# Altium footprint library Package_DFN_QFN.PcbLib: 735 footprints (part 34 of 46)
Each footprint in its own frame and in the unit in brackets; x right, y up, seen from the top. Pads: shape width x height; smd on the part's side, far side on the other; paste and mask are expansions set on the pad; w line width, h text height; cw(c..) or ccw(c..) is an arc to the next point about the centre after c.
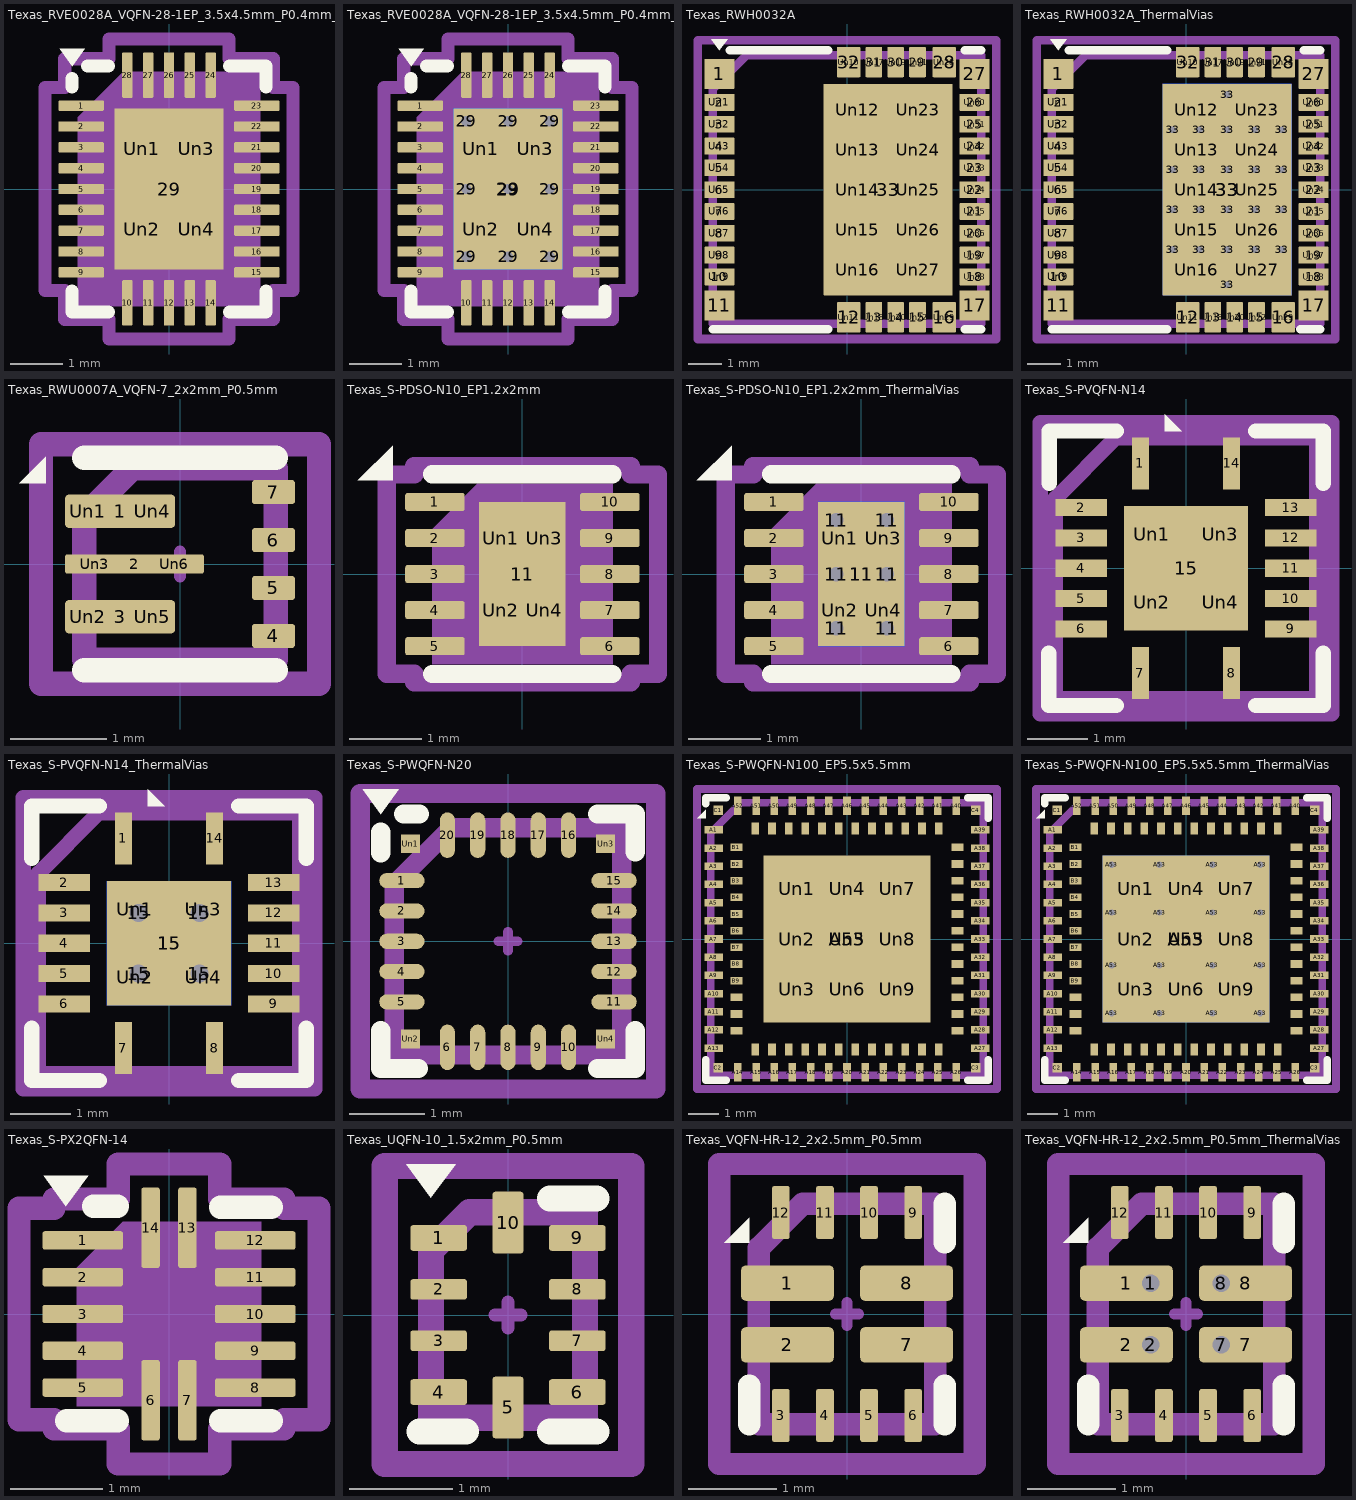
[diagram p33: the footprints below, top view; thin cyan lines are the x and y axes]

## Texas_RVE0028A_VQFN-28-1EP_3.5x4.5mm_P0.4mm_EP2.1x3.1mm [mm] "Texas_RVE0028A_VQFN-28-1EP_3.5x4.5mm_P0.4mm_EP2.1x3.1mm"
pads (33):
  rrect25% 0.875x0.2 smd: 1(-1.687,1.6) 2(-1.687,1.2) 3(-1.687,0.8) 4(-1.687,0.4) 5(-1.687,0) 6(-1.687,-0.4) 7(-1.687,-0.8) 8(-1.687,-1.2) 9(-1.687,-1.6) 15(1.687,-1.6) 16(1.687,-1.2) 17(1.687,-0.8) 18(1.687,-0.4) 19(1.687,0) 20(1.687,0.4) 21(1.687,0.8) 22(1.687,1.2) 23(1.687,1.6)
  rrect25% 0.2x0.875 smd: 10(-0.8,-2.187) 11(-0.4,-2.187) 12(0,-2.187) 13(0.4,-2.187) 14(0.8,-2.187) 24(0.8,2.187) 25(0.4,2.187) 26(0,2.187) 27(-0.4,2.187) 28(-0.8,2.187)
  rect 2.1x3.1 smd: 29(0,0)
  rrect25% 0.85x1.25 on Top Paste: Un1(-0.525,0.775) Un2(-0.525,-0.775) Un3(0.525,0.775) Un4(0.525,-0.775)
F.SilkS:
  region: -1.86,2.36 -2.1,2.69 -1.62,2.69
  lines w0.254: -1.86,-1.96 -1.86,-2.36 -1.16,-2.36 ; -1.86,1.96 -1.86,2.12 ; -1.56,2.36 -1.16,2.36 ; 1.16,-2.36 1.86,-2.36 1.86,-1.96 ; 1.16,2.36 1.86,2.36 1.86,1.96
Top Component Center:
  lines w0.127: -0.127,0 0.127,0 -0.127,0 ; 0,-0.127 0,0.127 0,-0.127
Top Assembly:
  region: 1.75,-2.25 -1.75,-2.25 -1.75,1.375 -0.875,2.25 1.75,2.25
Top Courtyard:
  lines w0.254: -2.38,-1.95 -2,-1.95 -2,-2.5 -1.15,-2.5 -1.15,-2.88 1.15,-2.88 1.15,-2.5 2,-2.5 2,-1.95 2.38,-1.95 2.38,1.95 2,1.95 2,2.5 1.15,2.5 1.15,2.88 -1.15,2.88 -1.15,2.5 -2,2.5 -2,1.95 -2.38,1.95 -2.38,-1.95
Top Designator:
  text ".Designator" at -3.43,-0.344 h1.52
3D body "Texas_RVE0028A_VQFN-28-1EP_3.5x4.5mm_P0.4mm_EP2.1x3.1mm.step": height 0.8, standoff 0, extent -1.75,-2.25 1.75,2.25

## Texas_RVE0028A_VQFN-28-1EP_3.5x4.5mm_P0.4mm_EP2.1x3.1mm_ThermalVias [mm] "Texas_RVE0028A_VQFN-28-1EP_3.5x4.5mm_P0.4mm_EP2.1x3.1mm_ThermalVias"
pads (43):
  rrect25% 0.875x0.2 smd: 1(-1.687,1.6) 2(-1.687,1.2) 3(-1.687,0.8) 4(-1.687,0.4) 5(-1.687,0) 6(-1.687,-0.4) 7(-1.687,-0.8) 8(-1.687,-1.2) 9(-1.687,-1.6) 15(1.687,-1.6) 16(1.687,-1.2) 17(1.687,-0.8) 18(1.687,-0.4) 19(1.687,0) 20(1.687,0.4) 21(1.687,0.8) 22(1.687,1.2) 23(1.687,1.6)
  rrect25% 0.2x0.875 smd: 10(-0.8,-2.187) 11(-0.4,-2.187) 12(0,-2.187) 13(0.4,-2.187) 14(0.8,-2.187) 24(0.8,2.187) 25(0.4,2.187) 26(0,2.187) 27(-0.4,2.187) 28(-0.8,2.187)
  round 0.5 hole 0.2: 29(-0.8,-1.3) 29(-0.8,0) 29(-0.8,1.3) 29(0,-1.3) 29(0,0) 29(0,1.3) 29(0.8,-1.3) 29(0.8,0) 29(0.8,1.3)
  rect 2.1x3.1 smd: 29(0,0)
  rect 2.1x3.1 smd far side: 29(0,0)
  rrect25% 0.88x1.3 on Top Paste: Un1(-0.525,0.775) Un2(-0.525,-0.775) Un3(0.525,0.775) Un4(0.525,-0.775)
F.SilkS:
  region: -1.86,2.36 -2.1,2.69 -1.62,2.69
  lines w0.254: -1.86,-1.96 -1.86,-2.36 -1.16,-2.36 ; -1.86,1.96 -1.86,2.12 ; -1.56,2.36 -1.16,2.36 ; 1.16,-2.36 1.86,-2.36 1.86,-1.96 ; 1.16,2.36 1.86,2.36 1.86,1.96
Top Component Center:
  lines w0.127: -0.127,0 0.127,0 -0.127,0 ; 0,-0.127 0,0.127 0,-0.127
Top Assembly:
  region: 1.75,-2.25 -1.75,-2.25 -1.75,1.375 -0.875,2.25 1.75,2.25
Top Courtyard:
  lines w0.254: -2.38,-1.95 -2,-1.95 -2,-2.5 -1.15,-2.5 -1.15,-2.88 1.15,-2.88 1.15,-2.5 2,-2.5 2,-1.95 2.38,-1.95 2.38,1.95 2,1.95 2,2.5 1.15,2.5 1.15,2.88 -1.15,2.88 -1.15,2.5 -2,2.5 -2,1.95 -2.38,1.95 -2.38,-1.95
Top Designator:
  text ".Designator" at -3.43,-0.344 h1.52
3D body "Texas_RVE0028A_VQFN-28-1EP_3.5x4.5mm_P0.4mm_EP2.1x3.1mm.step": height 0.8, standoff 0, extent -1.75,-2.25 1.75,2.25

## Texas_RWH0032A [mm] "Texas_RWH0032A"
pads (71):
  rrect6% 0.9x0.9 smd: 1(-3.8,3.45) 11(-3.8,-3.45) 17(3.8,-3.45) 27(3.8,3.45)
  rrect10% 0.9x0.5 smd: 2(-3.8,2.6) 3(-3.8,1.95) 4(-3.8,1.3) 5(-3.8,0.65) 6(-3.8,0) 7(-3.8,-0.65) 8(-3.8,-1.3) 9(-3.8,-1.95) 10(-3.8,-2.6) 18(3.8,-2.6) 19(3.8,-1.95) 20(3.8,-1.3) 21(3.8,-0.65) 22(3.8,0) 23(3.8,0.65) 24(3.8,1.3) 25(3.8,1.95) 26(3.8,2.6)
  rrect7% 0.7x0.9 smd: 12(0.05,-3.8) 16(2.9,-3.8) 28(2.9,3.8) 32(0.05,3.8)
  rrect10% 0.5x0.9 smd: 13(0.8,-3.8) 14(1.45,-3.8) 15(2.1,-3.8) 29(2.1,3.8) 30(1.45,3.8) 31(0.8,3.8)
  rrect1% 3.85x6.3 smd: 33(1.225,0)
  rrect12% 0.76x0.4 on Top Paste: Un1(-3.8,2.6) Un2(-3.8,1.95) Un3(-3.8,1.3) Un4(-3.8,0.65) Un5(-3.8,0) Un6(-3.8,-0.65) Un7(-3.8,-1.3) Un8(-3.8,-1.95) Un9(-3.8,-2.6) Un30(3.8,2.6) Un31(3.8,1.95) Un32(3.8,1.3) Un33(3.8,0.65) Un34(3.8,0) Un35(3.8,-0.65) Un36(3.8,-1.3) Un37(3.8,-1.95) Un38(3.8,-2.6)
  rrect8% 0.6x0.76 on Top Paste: Un10(0.05,3.8) Un11(0.05,-3.8) Un28(2.9,3.8) Un29(2.9,-3.8)
  rrect5% 1.6x0.99 on Top Paste: Un12(0.325,2.38) Un13(0.325,1.19) Un14(0.325,0) Un15(0.325,-1.19) Un16(0.325,-2.38) Un23(2.125,2.38) Un24(2.125,1.19) Un25(2.125,0) Un26(2.125,-1.19) Un27(2.125,-2.38)
  rrect12% 0.4x0.76 on Top Paste: Un17(0.8,3.8) Un18(0.8,-3.8) Un19(1.45,3.8) Un20(1.45,-3.8) Un21(2.1,3.8) Un22(2.1,-3.8)
F.SilkS:
  region: -3.8,4.16 -4.04,4.49 -3.56,4.49
  lines w0.254: -4,-4.16 -0.56,-4.16 ; -3.49,4.16 -0.56,4.16 ; 3.51,-4.16 4,-4.16 ; 3.51,4.16 4,4.16
Top Component Center:
  lines w0.127: -0.127,0 0.127,0 -0.127,0 ; 0,-0.127 0,0.127 0,-0.127
Top Assembly:
  lines w0.254: -4,-4 4,-4 4,4 -3,4 -4,3 -4,-4
Top Courtyard:
  lines w0.254: -4.45,-4.45 4.45,-4.45 4.45,4.45 -4.45,4.45 -4.45,-4.45
Top Designator:
  text ".Designator" at -3.43,-0.344 h1.52

## Texas_RWH0032A_ThermalVias [mm] "Texas_RWH0032A_ThermalVias"
pads (94):
  rrect6% 0.9x0.9 smd: 1(-3.8,3.45) 11(-3.8,-3.45) 17(3.8,-3.45) 27(3.8,3.45)
  rrect10% 0.9x0.5 smd: 2(-3.8,2.6) 3(-3.8,1.95) 4(-3.8,1.3) 5(-3.8,0.65) 6(-3.8,0) 7(-3.8,-0.65) 8(-3.8,-1.3) 9(-3.8,-1.95) 10(-3.8,-2.6) 18(3.8,-2.6) 19(3.8,-1.95) 20(3.8,-1.3) 21(3.8,-0.65) 22(3.8,0) 23(3.8,0.65) 24(3.8,1.3) 25(3.8,1.95) 26(3.8,2.6)
  rrect7% 0.7x0.9 smd: 12(0.05,-3.8) 16(2.9,-3.8) 28(2.9,3.8) 32(0.05,3.8)
  rrect10% 0.5x0.9 smd: 13(0.8,-3.8) 14(1.45,-3.8) 15(2.1,-3.8) 29(2.1,3.8) 30(1.45,3.8) 31(0.8,3.8)
  round 0.5 hole 0.2: 33(-0.4,-1.785) 33(-0.4,-0.595) 33(-0.4,0.595) 33(-0.4,1.785) 33(0.4,-1.785) 33(0.4,-0.595) 33(0.4,0.595) 33(0.4,1.785) 33(1.225,-2.835) 33(1.225,-1.785) 33(1.225,-0.595) 33(1.225,0.595) 33(1.225,1.785) 33(1.225,2.835) 33(2.05,-1.785) 33(2.05,-0.595) 33(2.05,0.595) 33(2.05,1.785) 33(2.85,-1.785) 33(2.85,-0.595) 33(2.85,0.595) 33(2.85,1.785)
  rrect1% 3.85x6.3 smd: 33(1.225,0)
  rrect1% 3.85x6.3 smd far side: 33(1.225,0)
  rrect12% 0.76x0.4 on Top Paste: Un1(-3.8,2.6) Un2(-3.8,1.95) Un3(-3.8,1.3) Un4(-3.8,0.65) Un5(-3.8,0) Un6(-3.8,-0.65) Un7(-3.8,-1.3) Un8(-3.8,-1.95) Un9(-3.8,-2.6) Un30(3.8,2.6) Un31(3.8,1.95) Un32(3.8,1.3) Un33(3.8,0.65) Un34(3.8,0) Un35(3.8,-0.65) Un36(3.8,-1.3) Un37(3.8,-1.95) Un38(3.8,-2.6)
  rrect8% 0.6x0.76 on Top Paste: Un10(0.05,3.8) Un11(0.05,-3.8) Un28(2.9,3.8) Un29(2.9,-3.8)
  rrect5% 1.6x0.99 on Top Paste: Un12(0.325,2.38) Un13(0.325,1.19) Un14(0.325,0) Un15(0.325,-1.19) Un16(0.325,-2.38) Un23(2.125,2.38) Un24(2.125,1.19) Un25(2.125,0) Un26(2.125,-1.19) Un27(2.125,-2.38)
  rrect12% 0.4x0.76 on Top Paste: Un17(0.8,3.8) Un18(0.8,-3.8) Un19(1.45,3.8) Un20(1.45,-3.8) Un21(2.1,3.8) Un22(2.1,-3.8)
F.SilkS:
  region: -3.8,4.16 -4.04,4.49 -3.56,4.49
  lines w0.254: -4,-4.16 -0.56,-4.16 ; -3.49,4.16 -0.56,4.16 ; 3.4,-4.16 4,-4.16 ; 3.51,4.16 4,4.16
Top Component Center:
  lines w0.127: -0.127,0 0.127,0 -0.127,0 ; 0,-0.127 0,0.127 0,-0.127
Top Assembly:
  lines w0.254: -4,-4 -4,3 -3,4 4,4 4,-4 -4,-4
Top Courtyard:
  lines w0.254: -4.45,-4.45 -4.45,4.45 4.45,4.45 4.45,-4.45 -4.45,-4.45
Top Designator:
  text ".Designator" at -3.43,-0.344 h1.52

## Texas_RWU0007A_VQFN-7_2x2mm_P0.5mm [mm] "Texas_RWU0007A_VQFN-7_2x2mm_P0.5mm"
pads (13):
  rrect25% 1.15x0.35 smd: 1(-0.625,0.55) 3(-0.625,-0.55)
  rrect25% 1.45x0.2 smd: 2(-0.475,0)
  rrect25% 0.45x0.25 smd: 4(0.975,-0.75) 5(0.975,-0.25) 6(0.975,0.25) 7(0.975,0.75)
  rrect25% 0.475x0.35 on Top Paste: Un1(-0.963,0.55) Un2(-0.963,-0.55) Un4(-0.288,0.55) Un5(-0.288,-0.55)
  rrect25% 0.625x0.2 on Top Paste: Un3(-0.887,0) Un6(-0.062,0)
F.SilkS:
  region: -1.4,0.84 -1.68,0.84 -1.4,1.12
  lines w0.254: -1,-1.11 1,-1.11 ; -1,1.11 1,1.11
Top Component Center:
  lines w0.127: -0.127,0 0.127,0 -0.127,0 ; 0,-0.127 0,0.127 0,-0.127
Top Assembly:
  lines w0.254: -1,-1 -1,0.5 -0.5,1 1,1 1,-1 -1,-1
Top Courtyard:
  lines w0.254: -1.45,-1.25 -1.45,1.25 1.45,1.25 1.45,-1.25 -1.45,-1.25
Top Designator:
  text ".Designator" at -2.251,-0.226 h1

## Texas_S-PDSO-N10_EP1.2x2mm [mm] "Texas_S-PDSO-N10_EP1.2x2mm"
pads (15):
  rrect25% 0.825x0.25 smd: 1(-1.212,1) 2(-1.212,0.5) 3(-1.212,0) 4(-1.212,-0.5) 5(-1.212,-1) 6(1.212,-1) 7(1.212,-0.5) 8(1.212,0) 9(1.212,0.5) 10(1.212,1)
  rect 1.2x2 smd: 11(0,0)
  rrect25% 0.48x0.81 on Top Paste: Un1(-0.3,0.5) Un2(-0.3,-0.5) Un3(0.3,0.5) Un4(0.3,-0.5)
F.SilkS:
  region: -1.8,1.3 -2.28,1.3 -1.8,1.78
  lines w0.254: -1.25,-1.385 1.25,-1.385 ; -1.25,1.385 1.25,1.385
Top Component Center:
  lines w0.127: -0.127,0 0.127,0 -0.127,0 ; 0,-0.127 0,0.127 0,-0.127
Top Assembly:
  region: 1.25,-1.25 -1.25,-1.25 -1.25,0.625 -0.625,1.25 1.25,1.25
Top Courtyard:
  lines w0.254: -1.88,-1.38 -1.5,-1.38 -1.5,-1.5 1.5,-1.5 1.5,-1.38 1.88,-1.38 1.88,1.38 1.5,1.38 1.5,1.5 -1.5,1.5 -1.5,1.38 -1.88,1.38 -1.88,-1.38
Top Designator:
  text ".Designator" at -3.43,-0.344 h1.52

## Texas_S-PDSO-N10_EP1.2x2mm_ThermalVias [mm] "Texas_S-PDSO-N10_EP1.2x2mm_ThermalVias"
pads (22):
  rrect25% 0.825x0.25 smd: 1(-1.212,1) 2(-1.212,0.5) 3(-1.212,0) 4(-1.212,-0.5) 5(-1.212,-1) 6(1.212,-1) 7(1.212,-0.5) 8(1.212,0) 9(1.212,0.5) 10(1.212,1)
  round 0.5 hole 0.2: 11(-0.35,-0.75) 11(-0.35,0) 11(-0.35,0.75) 11(0.35,-0.75) 11(0.35,0) 11(0.35,0.75)
  rect 1.2x2 smd: 11(0,0)
  rect 1.2x2 smd far side: 11(0,0)
  rrect25% 0.5x0.84 on Top Paste: Un1(-0.3,0.5) Un2(-0.3,-0.5) Un3(0.3,0.5) Un4(0.3,-0.5)
F.SilkS:
  region: -1.8,1.3 -2.28,1.3 -1.8,1.78
  lines w0.254: -1.25,-1.385 1.25,-1.385 ; -1.25,1.385 1.25,1.385
Top Component Center:
  lines w0.127: -0.127,0 0.127,0 -0.127,0 ; 0,-0.127 0,0.127 0,-0.127
Top Assembly:
  region: 1.25,-1.25 -1.25,-1.25 -1.25,0.625 -0.625,1.25 1.25,1.25
Top Courtyard:
  lines w0.254: -1.88,-1.38 -1.5,-1.38 -1.5,-1.5 1.5,-1.5 1.5,-1.38 1.88,-1.38 1.88,1.38 1.5,1.38 1.5,1.5 -1.5,1.5 -1.5,1.38 -1.88,1.38 -1.88,-1.38
Top Designator:
  text ".Designator" at -3.43,-0.344 h1.52

## Texas_S-PVQFN-N14 [mm] "Texas_S-PVQFN-N14"
pads (19):
  rect 0.28x0.85 smd: 1(-0.75,1.725) 7(-0.75,-1.725) 8(0.75,-1.725) 14(0.75,1.725)
  rect 0.85x0.28 smd: 2(-1.725,1) 3(-1.725,0.5) 4(-1.725,0) 5(-1.725,-0.5) 6(-1.725,-1) 9(1.725,-1) 10(1.725,-0.5) 11(1.725,0) 12(1.725,0.5) 13(1.725,1)
  rect 2.05x2.05 smd: 15(0,0)
  rect 0.82x0.82 on Top Paste: Un1(-0.56,0.56) Un2(-0.56,-0.56) Un3(0.56,0.56) Un4(0.56,-0.56)
F.SilkS:
  region: -0.07,2.26 -0.35,2.26 -0.35,2.54
  lines w0.254: -2.26,-1.4 -2.26,-2.26 -1.15,-2.26 ; -2.255,1.4 -2.255,2.26 -1.145,2.26 ; 1.15,-2.26 2.26,-2.26 2.26,-1.4 ; 1.15,2.26 2.26,2.26 2.26,1.4
Top Component Center:
  lines w0.127: -0.127,0 0.127,0 -0.127,0 ; 0,-0.127 0,0.127 0,-0.127
Top Assembly:
  lines w0.254: -2.15,-2.15 2.15,-2.15 2.15,2.15 -1.15,2.15 -2.15,1.15 -2.15,-2.15
Top Courtyard:
  lines w0.254: -2.4,-2.4 2.4,-2.4 2.4,2.4 -2.4,2.4 -2.4,-2.4
Top Designator:
  text ".Designator" at -3.43,-0.344 h1.52
3D body "Texas_S-PVQFN-N14.step": height 0.92, standoff 0, extent -2.15,-2.15 2.15,2.15

## Texas_S-PVQFN-N14_ThermalVias [mm] "Texas_S-PVQFN-N14_ThermalVias"
pads (24):
  rect 0.28x0.85 smd: 1(-0.75,1.725) 7(-0.75,-1.725) 8(0.75,-1.725) 14(0.75,1.725)
  rect 0.85x0.28 smd: 2(-1.725,1) 3(-1.725,0.5) 4(-1.725,0) 5(-1.725,-0.5) 6(-1.725,-1) 9(1.725,-1) 10(1.725,-0.5) 11(1.725,0) 12(1.725,0.5) 13(1.725,1)
  round 0.6 hole 0.3: 15(-0.5,-0.5) 15(-0.5,0.5) 15(0.5,-0.5) 15(0.5,0.5)
  rect 2.05x2.05 smd: 15(0,0)
  rect 2.05x2.05 smd far side: 15(0,0)
  rect 0.82x0.82 on Top Paste: Un1(-0.56,0.56) Un2(-0.56,-0.56) Un3(0.56,0.56) Un4(0.56,-0.56)
F.SilkS:
  region: -0.07,2.26 -0.35,2.26 -0.35,2.54
  lines w0.254: -2.26,-1.4 -2.26,-2.26 -1.15,-2.26 ; -2.26,1.4 -2.26,2.26 -1.15,2.26 ; 1.15,-2.26 2.26,-2.26 2.26,-1.4 ; 1.15,2.26 2.26,2.26 2.26,1.4
Top Component Center:
  lines w0.127: -0.127,0 0.127,0 -0.127,0 ; 0,-0.127 0,0.127 0,-0.127
Top Assembly:
  lines w0.254: -2.15,-2.15 2.15,-2.15 2.15,2.15 -1.15,2.15 -2.15,1.15 -2.15,-2.15
Top Courtyard:
  lines w0.254: -2.4,-2.4 2.4,-2.4 2.4,2.4 -2.4,2.4 -2.4,-2.4
Top Designator:
  text ".Designator" at -3.43,-0.344 h1.52
3D body "Texas_S-PVQFN-N14.step": height 0.92, standoff 0, extent -2.15,-2.15 2.15,2.15

## Texas_S-PWQFN-N20 [mm] "Texas_S-PWQFN-N20"
pads (24):
  rrect100% 0.6x0.2 smd: 1(-1.4,0.8) 2(-1.4,0.4) 3(-1.4,0) 4(-1.4,-0.4) 5(-1.4,-0.8) 11(1.4,-0.8) 12(1.4,-0.4) 13(1.4,0) 14(1.4,0.4) 15(1.4,0.8)
  rrect100% 0.2x0.6 smd: 6(-0.8,-1.4) 7(-0.4,-1.4) 8(0,-1.4) 9(0.4,-1.4) 10(0.8,-1.4) 16(0.8,1.4) 17(0.4,1.4) 18(0,1.4) 19(-0.4,1.4) 20(-0.8,1.4)
  rect 0.25x0.25 smd: Un1(-1.288,1.288) Un2(-1.288,-1.288) Un3(1.288,1.288) Un4(1.288,-1.288)
F.SilkS:
  region: -1.68,1.68 -1.92,2.01 -1.44,2.01
  lines w0.254: -1.68,-1.18 -1.68,-1.68 -1.18,-1.68 ; -1.68,1.17 -1.68,1.44 ; -1.38,1.68 -1.17,1.68 ; 1.18,-1.68 1.68,-1.68 1.68,-1.18 ; 1.18,1.68 1.68,1.68 1.68,1.18
Top Component Center:
  lines w0.127: -0.127,0 0.127,0 -0.127,0 ; 0,-0.127 0,0.127 0,-0.127
Top Assembly:
  lines w0.254: -1.5,-1.5 1.5,-1.5 1.5,1.5 -0.75,1.5 -1.5,0.75 -1.5,-1.5
Top Courtyard:
  lines w0.254: -1.95,-1.95 1.95,-1.95 1.95,1.95 -1.95,1.95 -1.95,-1.95
Top Designator:
  text ".Designator" at -3.43,-0.344 h1.52
3D body "Texas_S-PWQFN-N20.step": height 0.78, standoff 0, extent -1.5,-1.5 1.5,1.5

## Texas_S-PWQFN-N100_EP5.5x5.5mm [mm] "Texas_S-PWQFN-N100_EP5.5x5.5mm"
pads (114):
  rect 0.6x0.25 smd: A1(-4.4,3.6) A2(-4.4,3) A3(-4.4,2.4) A4(-4.4,1.8) A5(-4.4,1.2) A6(-4.4,0.6) A7(-4.4,0) A8(-4.4,-0.6) A9(-4.4,-1.2) A10(-4.4,-1.8) A11(-4.4,-2.4) A12(-4.4,-3) A13(-4.4,-3.6) A27(4.4,-3.6) A28(4.4,-3) A29(4.4,-2.4) A30(4.4,-1.8) A31(4.4,-1.2) A32(4.4,-0.6) A33(4.4,0) A34(4.4,0.6) A35(4.4,1.2) A36(4.4,1.8) A37(4.4,2.4) A38(4.4,3) A39(4.4,3.6)
  rect 0.25x0.6 smd: A14(-3.6,-4.4) A15(-3,-4.4) A16(-2.4,-4.4) A17(-1.8,-4.4) A18(-1.2,-4.4) A19(-0.6,-4.4) A20(0,-4.4) A21(0.6,-4.4) A22(1.2,-4.4) A23(1.8,-4.4) A24(2.4,-4.4) A25(3,-4.4) A26(3.6,-4.4) A40(3.6,4.4) A41(3,4.4) A42(2.4,4.4) A43(1.8,4.4) A44(1.2,4.4) A45(0.6,4.4) A46(0,4.4) A47(-0.6,4.4) A48(-1.2,4.4) A49(-1.8,4.4) A50(-2.4,4.4) A51(-3,4.4) A52(-3.6,4.4)
  rect 5.5x5.5 smd: A53(0,0)
  rect 0.4x0.25 smd: B1(-3.65,3.025) B2(-3.65,2.475) B3(-3.65,1.925) B4(-3.65,1.375) B5(-3.65,0.825) B6(-3.65,0.275) B7(-3.65,-0.275) B8(-3.65,-0.825) B9(-3.65,-1.375) B10(-3.65,-1.925) B11(-3.65,-2.475) B12(-3.65,-3.025) B25(3.65,-3.025) B26(3.65,-2.475) B27(3.65,-1.925) B28(3.65,-1.375) B29(3.65,-0.825) B30(3.65,-0.275) B31(3.65,0.275) B32(3.65,0.825) B33(3.65,1.375) B34(3.65,1.925) B35(3.65,2.475) B36(3.65,3.025)
  rect 0.25x0.4 smd: B13(-3.025,-3.65) B14(-2.475,-3.65) B15(-1.925,-3.65) B16(-1.375,-3.65) B17(-0.825,-3.65) B18(-0.275,-3.65) B19(0.275,-3.65) B20(0.825,-3.65) B21(1.375,-3.65) B22(1.925,-3.65) B23(2.475,-3.65) B24(3.025,-3.65) B37(3.025,3.65) B38(2.475,3.65) B39(1.925,3.65) B40(1.375,3.65) B41(0.825,3.65) B42(0.275,3.65) B43(-0.275,3.65) B44(-0.825,3.65) B45(-1.375,3.65) B46(-1.925,3.65) B47(-2.475,3.65) B48(-3.025,3.65)
  rect 0.3x0.3 smd: C1(-4.25,4.25) C2(-4.25,-4.25) C3(4.25,-4.25) C4(4.25,4.25)
  rect 1.5x1.5 on Top Paste: Un1(-1.66,1.66) Un2(-1.66,0) Un3(-1.66,-1.66) Un4(0,1.66) Un5(0,0) Un6(0,-1.66) Un7(1.66,1.66) Un8(1.66,0) Un9(1.66,-1.66)
F.SilkS:
  region: -4.66,3.99 -4.94,3.99 -4.66,4.27
  lines w0.254: -4.66,-3.99 -4.66,-4.66 -3.99,-4.66 ; -4.66,4.47 -4.66,4.66 -3.99,4.66 ; 3.99,-4.66 4.66,-4.66 4.66,-3.99 ; 3.99,4.66 4.66,4.66 4.66,3.99
Top Component Center:
  lines w0.127: -0.127,0 0.127,0 -0.127,0 ; 0,-0.127 0,0.127 0,-0.127
Top Assembly:
  lines w0.254: -4.5,-4.5 4.5,-4.5 4.5,4.5 -3.5,4.5 -4.5,3.5 -4.5,-4.5
Top Courtyard:
  lines w0.254: -4.95,-4.95 4.95,-4.95 4.95,4.95 -4.95,4.95 -4.95,-4.95
Top Designator:
  text ".Designator" at -3.43,-0.344 h1.52

## Texas_S-PWQFN-N100_EP5.5x5.5mm_ThermalVias [mm] "Texas_S-PWQFN-N100_EP5.5x5.5mm_ThermalVias"
pads (131):
  rect 0.6x0.25 smd: A1(-4.4,3.6) A2(-4.4,3) A3(-4.4,2.4) A4(-4.4,1.8) A5(-4.4,1.2) A6(-4.4,0.6) A7(-4.4,0) A8(-4.4,-0.6) A9(-4.4,-1.2) A10(-4.4,-1.8) A11(-4.4,-2.4) A12(-4.4,-3) A13(-4.4,-3.6) A27(4.4,-3.6) A28(4.4,-3) A29(4.4,-2.4) A30(4.4,-1.8) A31(4.4,-1.2) A32(4.4,-0.6) A33(4.4,0) A34(4.4,0.6) A35(4.4,1.2) A36(4.4,1.8) A37(4.4,2.4) A38(4.4,3) A39(4.4,3.6)
  rect 0.25x0.6 smd: A14(-3.6,-4.4) A15(-3,-4.4) A16(-2.4,-4.4) A17(-1.8,-4.4) A18(-1.2,-4.4) A19(-0.6,-4.4) A20(0,-4.4) A21(0.6,-4.4) A22(1.2,-4.4) A23(1.8,-4.4) A24(2.4,-4.4) A25(3,-4.4) A26(3.6,-4.4) A40(3.6,4.4) A41(3,4.4) A42(2.4,4.4) A43(1.8,4.4) A44(1.2,4.4) A45(0.6,4.4) A46(0,4.4) A47(-0.6,4.4) A48(-1.2,4.4) A49(-1.8,4.4) A50(-2.4,4.4) A51(-3,4.4) A52(-3.6,4.4)
  round 0.5 hole 0.2: A53(-2.45,-2.45) A53(-2.45,-0.87) A53(-2.45,0.87) A53(-2.45,2.45) A53(-0.87,-2.45) A53(-0.87,-0.87) A53(-0.87,0.87) A53(-0.87,2.45) A53(0.87,-2.45) A53(0.87,-0.87) A53(0.87,0.87) A53(0.87,2.45) A53(2.45,-2.45) A53(2.45,-0.87) A53(2.45,0.87) A53(2.45,2.45)
  rect 5.5x5.5 smd: A53(0,0)
  rect 5.5x5.5 smd far side: A53(0,0)
  rect 0.4x0.25 smd: B1(-3.65,3.025) B2(-3.65,2.475) B3(-3.65,1.925) B4(-3.65,1.375) B5(-3.65,0.825) B6(-3.65,0.275) B7(-3.65,-0.275) B8(-3.65,-0.825) B9(-3.65,-1.375) B10(-3.65,-1.925) B11(-3.65,-2.475) B12(-3.65,-3.025) B25(3.65,-3.025) B26(3.65,-2.475) B27(3.65,-1.925) B28(3.65,-1.375) B29(3.65,-0.825) B30(3.65,-0.275) B31(3.65,0.275) B32(3.65,0.825) B33(3.65,1.375) B34(3.65,1.925) B35(3.65,2.475) B36(3.65,3.025)
  rect 0.25x0.4 smd: B13(-3.025,-3.65) B14(-2.475,-3.65) B15(-1.925,-3.65) B16(-1.375,-3.65) B17(-0.825,-3.65) B18(-0.275,-3.65) B19(0.275,-3.65) B20(0.825,-3.65) B21(1.375,-3.65) B22(1.925,-3.65) B23(2.475,-3.65) B24(3.025,-3.65) B37(3.025,3.65) B38(2.475,3.65) B39(1.925,3.65) B40(1.375,3.65) B41(0.825,3.65) B42(0.275,3.65) B43(-0.275,3.65) B44(-0.825,3.65) B45(-1.375,3.65) B46(-1.925,3.65) B47(-2.475,3.65) B48(-3.025,3.65)
  rect 0.3x0.3 smd: C1(-4.25,4.25) C2(-4.25,-4.25) C3(4.25,-4.25) C4(4.25,4.25)
  rect 1.5x1.5 on Top Paste: Un1(-1.66,1.66) Un2(-1.66,0) Un3(-1.66,-1.66) Un4(0,1.66) Un5(0,0) Un6(0,-1.66) Un7(1.66,1.66) Un8(1.66,0) Un9(1.66,-1.66)
F.SilkS:
  region: -4.66,3.99 -4.94,3.99 -4.66,4.27
  lines w0.254: -4.66,-3.99 -4.66,-4.66 -3.99,-4.66 ; -4.66,4.47 -4.66,4.66 -3.99,4.66 ; 3.99,-4.66 4.66,-4.66 4.66,-3.99 ; 3.99,4.66 4.66,4.66 4.66,3.99
Top Component Center:
  lines w0.127: -0.127,0 0.127,0 -0.127,0 ; 0,-0.127 0,0.127 0,-0.127
Top Assembly:
  lines w0.254: -4.5,-4.5 4.5,-4.5 4.5,4.5 -3.5,4.5 -4.5,3.5 -4.5,-4.5
Top Courtyard:
  lines w0.254: -4.95,-4.95 4.95,-4.95 4.95,4.95 -4.95,4.95 -4.95,-4.95
Top Designator:
  text ".Designator" at -3.43,-0.344 h1.52

## Texas_S-PX2QFN-14 [mm] "Texas_S-PX2QFN-14"
pads (14):
  rrect25% 0.875x0.2 smd: 1(-0.937,0.8) 2(-0.937,0.4) 3(-0.937,0) 4(-0.937,-0.4) 5(-0.937,-0.8) 8(0.937,-0.8) 9(0.937,-0.4) 10(0.937,0) 11(0.937,0.4) 12(0.937,0.8)
  rrect25% 0.2x0.875 smd: 6(-0.2,-0.937) 7(0.2,-0.937) 13(0.2,0.937) 14(-0.2,0.937)
F.SilkS:
  region: -1.12,1.17 -1.36,1.5 -0.88,1.5
  lines w0.254: -1.11,-1.16 -0.56,-1.16 ; -0.82,1.17 -0.56,1.17 ; 0.56,-1.16 1.11,-1.16 ; 0.56,1.16 1.11,1.16
Top Component Center:
  lines w0.127: -0.127,0 0.127,0 -0.127,0 ; 0,-0.127 0,0.127 0,-0.127
Top Assembly:
  region: 1,-1 -1,-1 -1,0.5 -0.5,1 1,1
Top Courtyard:
  lines w0.254: -1.63,-1.15 -1.25,-1.15 -1.25,-1.25 -0.55,-1.25 -0.55,-1.63 0.55,-1.63 0.55,-1.25 1.25,-1.25 1.25,-1.15 1.63,-1.15 1.63,1.15 1.25,1.15 1.25,1.25 0.55,1.25 0.55,1.63 -0.55,1.63 -0.55,1.25 -1.25,1.25 -1.25,1.15 -1.63,1.15 -1.63,-1.15
Top Designator:
  text ".Designator" at -2.251,-0.226 h1

## Texas_UQFN-10_1.5x2mm_P0.5mm [mm] "Texas_UQFN-10_1.5x2mm_P0.5mm"
pads (10):
  rrect20% 0.55x0.25 smd: 1(-0.675,0.75) 4(-0.675,-0.75) 6(0.675,-0.75) 9(0.675,0.75)
  rrect25% 0.55x0.2 smd: 2(-0.675,0.25) 3(-0.675,-0.25) 7(0.675,-0.25) 8(0.675,0.25)
  rrect17% 0.3x0.6 smd: 5(0,-0.9) 10(0,0.9)
F.SilkS:
  region: -0.75,1.14 -0.99,1.47 -0.51,1.47
  lines w0.254: -0.86,-1.135 -0.41,-1.135 ; 0.41,-1.135 0.86,-1.135 ; 0.41,1.135 0.86,1.135
Top Component Center:
  lines w0.127: -0.127,0 0.127,0 -0.127,0 ; 0,-0.127 0,0.127 0,-0.127
Top Assembly:
  lines w0.254: -0.75,-1 0.75,-1 0.75,1 -0.375,1 -0.75,0.625 -0.75,-1
Top Courtyard:
  lines w0.254: -1.2,-1.45 1.2,-1.45 1.2,1.45 -1.2,1.45 -1.2,-1.45
Top Designator:
  text ".Designator" at -2.251,-0.226 h1

## Texas_VQFN-HR-12_2x2.5mm_P0.5mm [mm] "Texas_VQFN-HR-12_2x2.5mm_P0.5mm"
pads (12):
  rrect25% 1.05x0.4 smd: 1(-0.675,0.35) 2(-0.675,-0.35) 7(0.675,-0.35) 8(0.675,0.35)
  rrect25% 0.2x0.6 smd: 3(-0.75,-1.15) 4(-0.25,-1.15) 5(0.25,-1.15) 6(0.75,-1.15) 9(0.75,1.15) 10(0.25,1.15) 11(-0.25,1.15) 12(-0.75,1.15)
F.SilkS:
  region: -1.11,0.81 -1.39,0.81 -1.11,1.09
  lines w0.254: -1.11,-1.25 -1.11,-0.81 ; 1.11,-1.25 1.11,-0.81 ; 1.11,0.81 1.11,1.25
Top Component Center:
  lines w0.127: -0.127,0 0.127,0 -0.127,0 ; 0,-0.127 0,0.127 0,-0.127
Top Assembly:
  lines w0.254: -1,-1.25 1,-1.25 1,1.25 -0.5,1.25 -1,0.75 -1,-1.25
Top Courtyard:
  lines w0.254: -1.45,-1.7 1.45,-1.7 1.45,1.7 -1.45,1.7 -1.45,-1.7
Top Designator:
  text ".Designator" at -2.251,-0.226 h1

## Texas_VQFN-HR-12_2x2.5mm_P0.5mm_ThermalVias [mm] "Texas_VQFN-HR-12_2x2.5mm_P0.5mm_ThermalVias"
pads (16):
  rrect25% 1.05x0.4 smd: 1(-0.675,0.35) 2(-0.675,-0.35) 7(0.675,-0.35) 8(0.675,0.35)
  round 0.4 hole 0.2: 1(-0.4,0.35) 2(-0.4,-0.35) 7(0.4,-0.35) 8(0.4,0.35)
  rrect25% 0.2x0.6 smd: 3(-0.75,-1.15) 4(-0.25,-1.15) 5(0.25,-1.15) 6(0.75,-1.15) 9(0.75,1.15) 10(0.25,1.15) 11(-0.25,1.15) 12(-0.75,1.15)
F.SilkS:
  region: -1.11,0.81 -1.39,0.81 -1.11,1.09
  lines w0.254: -1.11,-1.25 -1.11,-0.81 ; 1.11,-1.25 1.11,-0.81 ; 1.11,0.81 1.11,1.25
Top Component Center:
  lines w0.127: -0.127,0 0.127,0 -0.127,0 ; 0,-0.127 0,0.127 0,-0.127
Top Assembly:
  lines w0.254: -1,-1.25 1,-1.25 1,1.25 -0.5,1.25 -1,0.75 -1,-1.25
Top Courtyard:
  lines w0.254: -1.45,-1.7 1.45,-1.7 1.45,1.7 -1.45,1.7 -1.45,-1.7
Top Designator:
  text ".Designator" at -2.251,-0.226 h1